# Altium footprint library Teleoperation_Board_V1.0.PcbLib: 6 footprints
Each footprint in its own frame and in the unit in brackets; x right, y up, seen from the top. Pads: shape width x height; smd on the part's side, far side on the other; paste and mask are expansions set on the pad; w line width, h text height; cw(c..) or ccw(c..) is an arc to the next point about the centre after c.

## FP-CL10-IPC_B [mm] "Samsung CL10 0603 100nF ceramic capacitor, recreated to match FP-CL10-IPC_A pad geometry (original library footprint was missing)"

## FP-ERJ3EK-IPC_A [mm] "Panasonic ERJ-3EK 0603 resistor, recreated to match RESC1608X55X25ML10T15 pad geometry (original library footprint was missing)"

## PCBComponent_1 [mm]

## QFN40P700X700X90-57N-D [mm] "RP2040 QFN-56, 7x7mm body, 0.4mm pitch. Exposed pad 3.20x3.20mm per Raspberry Pi RP2040 datasheet Fig. 167 (explicitly smaller than standard QFN-56 e-pad, datasheet warns generic footprints need adjusting for this). Peripheral pad width/length inferred from partially-garbled datasheet table extraction -- verify against datasheet Figure 167 before fab."

## SOIC127P798X216-8N [mm] "ESTIMATED - standard industry-typical SOIC-8 208mil (wide-body) land pattern for AT25QF128A-SHB-T (1.27mm pitch, ~7.98mm lead span per part's own IPC name). Exact datasheet dims unavailable (scanned PDF, no extractable text) -- VERIFY against Renesas AT25QF128A mechanical drawing before fab."

## VP0265540000G-Footprint-1 [mm] "ESTIMATED - typical THT pad/drill for a 2-pos, 10.16mm pitch, M4.5 screw terminal block rated 6-20AWG (Amphenol Anytek VP series). Exact datasheet dims unavailable (scanned PDF, no extractable text) -- VERIFY pin diameter against manufacturer drawing or physical part before fab."